# Altium footprint library Terminal_Blocks_Pluggable PCB_5.08mm.PcbLib: 299 footprints (part 13 of 19)
Each footprint in its own frame and in the unit in brackets; x right, y up, seen from the top. Pads: shape width x height; smd on the part's side, far side on the other; paste and mask are expansions set on the pad; w line width, h text height; cw(c..) or ccw(c..) is an arc to the next point about the centre after c.
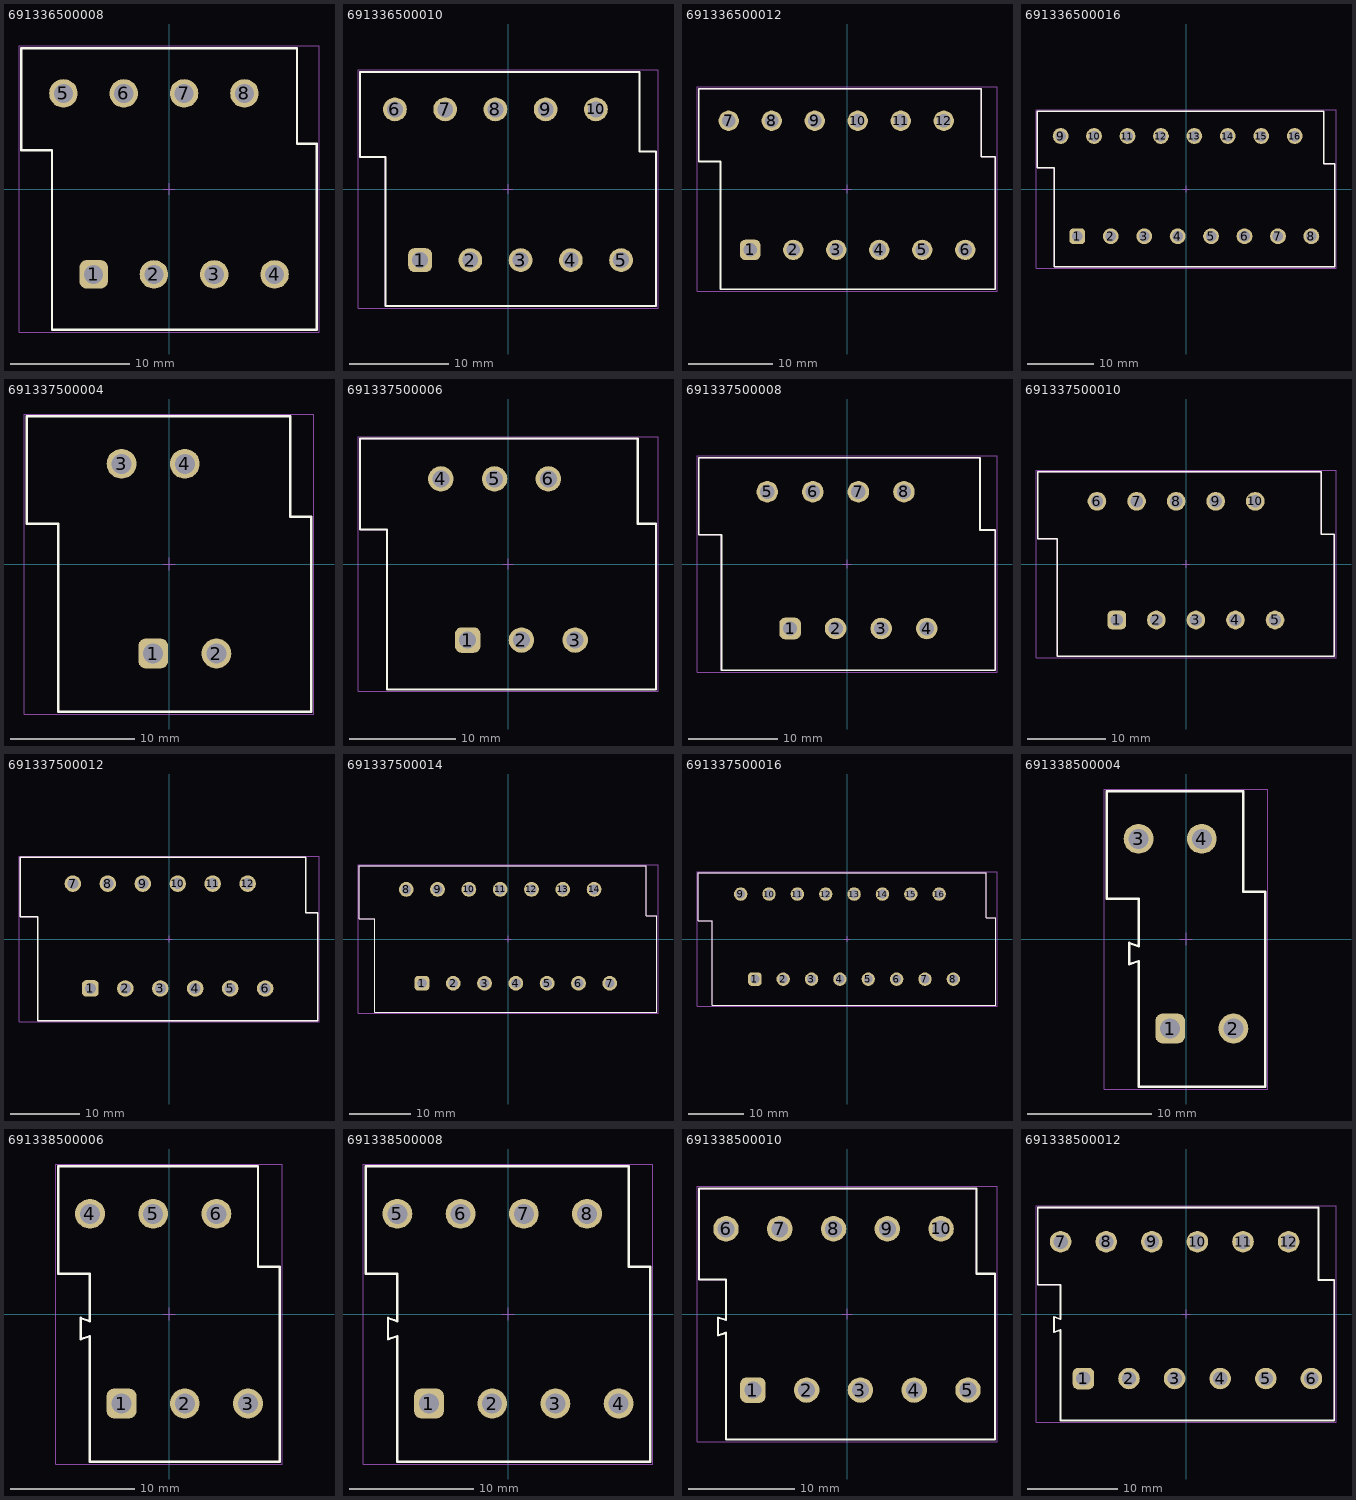
[diagram p12: the footprints below, top view; thin cyan lines are the x and y axes]

## 691336500008 [mm] "Double Level Vertical Header with Flanges, pitch 5.08mm, 08p"
height 22
pads (8):
  rrect50% 2.4x2.4 hole 1.6: 1(-6.35,-7.19)
  round 2.4 hole 1.6: 2(-1.27,-7.19) 3(3.81,-7.19) 4(8.89,-7.19) 5(-8.89,8.05) 6(-3.81,8.05) 7(1.27,8.05) 8(6.35,8.05)
Top Overlay:
  lines w0.2: -12.43,3.25 -9.85,3.25 -9.85,-11.85 12.43,-11.85 12.43,3.8 10.78,3.8 10.78,11.85 -12.43,11.85 -12.43,3.25
Top Designator:
  text ".Designator" at -7.498,-0.5 h1.5
Top Component Outline:
  lines w0.1: -12.43,3.25 -12.43,11.85 10.78,11.85 10.78,3.8 12.43,3.8 12.43,-11.85 -9.85,-11.85 -9.85,3.25 -12.43,3.25
Top 3D Body:
  lines w0.1: -12.43,3.25 -9.85,3.25 -9.85,-11.85 12.43,-11.85 12.43,3.8 10.78,3.8 10.78,11.85 -12.43,11.85 -12.43,3.25
Top Courtyard:
  lines w0.05: -12.63,-12.05 -12.63,12.05 12.63,12.05 12.63,-12.05 -12.63,-12.05
Top Component Center:
  lines w0.05: -0.5,0 0.5,0 ; 0,-0.5 0,0.5
3D body "691336500008.stp": height 22.06, standoff -3.84, extent -12.43,-11.85 12.43,11.85

## 691336500010 [mm] "Double Level Vertical Header with Flanges, pitch 5.08mm, 10p"
height 22
pads (10):
  rrect50% 2.4x2.4 hole 1.6: 1(-8.89,-7.19)
  round 2.4 hole 1.6: 2(-3.81,-7.19) 3(1.27,-7.19) 4(6.35,-7.19) 5(11.43,-7.19) 6(-11.43,8.05) 7(-6.35,8.05) 8(-1.27,8.05) 9(3.81,8.05) 10(8.89,8.05)
Top Overlay:
  lines w0.2: -14.97,3.25 -12.39,3.25 -12.39,-11.85 14.97,-11.85 14.97,3.8 13.32,3.8 13.32,11.85 -14.97,11.85 -14.97,3.25
Top Designator:
  text ".Designator" at -7.498,-0.5 h1.5
Top Component Outline:
  lines w0.1: -14.97,3.25 -14.97,11.85 13.32,11.85 13.32,3.8 14.97,3.8 14.97,-11.85 -12.39,-11.85 -12.39,3.25 -14.97,3.25
Top 3D Body:
  lines w0.1: -14.97,3.25 -12.39,3.25 -12.39,-11.85 14.97,-11.85 14.97,3.8 13.32,3.8 13.32,11.85 -14.97,11.85 -14.97,3.25
Top Courtyard:
  lines w0.05: -15.17,-12.05 -15.17,12.05 15.17,12.05 15.17,-12.05 -15.17,-12.05
Top Component Center:
  lines w0.05: -0.5,0 0.5,0 ; 0,-0.5 0,0.5
3D body "691336500010.stp": height 22.06, standoff -3.84, extent -14.97,-11.85 14.97,11.85

## 691336500012 [mm] "Double Level Vertical Header with Flanges, pitch 5.08mm, 12p"
height 22
pads (12):
  rrect50% 2.4x2.4 hole 1.6: 1(-11.43,-7.19)
  round 2.4 hole 1.6: 2(-6.35,-7.19) 3(-1.27,-7.19) 4(3.81,-7.19) 5(8.89,-7.19) 6(13.97,-7.19) 7(-13.97,8.05) 8(-8.89,8.05) 9(-3.81,8.05) 10(1.27,8.05) 11(6.35,8.05) 12(11.43,8.05)
Top Overlay:
  lines w0.2: -17.51,3.25 -17.51,11.85 15.86,11.85 15.86,3.8 17.51,3.8 17.51,-11.85 -14.93,-11.85 -14.93,3.25 -17.51,3.25
Top Designator:
  text ".Designator" at -7.498,-0.5 h1.5
Top Component Outline:
  lines w0.1: -17.51,3.25 -14.93,3.25 -14.93,-11.85 17.51,-11.85 17.51,3.8 15.86,3.8 15.86,11.85 -17.51,11.85 -17.51,3.25
Top 3D Body:
  lines w0.1: -17.51,3.25 -17.51,11.85 15.86,11.85 15.86,3.8 17.51,3.8 17.51,-11.85 -14.93,-11.85 -14.93,3.25 -17.51,3.25
Top Courtyard:
  lines w0.05: -17.71,-12.05 17.71,-12.05 17.71,12.05 -17.71,12.05 -17.71,-12.05
Top Component Center:
  lines w0.05: -0.5,0 0.5,0 ; 0,-0.5 0,0.5
3D body "691336500012.stp": height 22.06, standoff -3.84, extent -17.51,-11.85 17.51,11.85

## 691336500016 [mm] "Double Level Vertical Header with Flanges, pitch 5.08mm, 16p"
height 22
pads (16):
  rrect50% 2.4x2.4 hole 1.6: 1(-16.51,-7.19)
  round 2.4 hole 1.6: 2(-11.43,-7.19) 3(-6.35,-7.19) 4(-1.27,-7.19) 5(3.81,-7.19) 6(8.89,-7.19) 7(13.97,-7.19) 8(19.05,-7.19) 9(-19.05,8.05) 10(-13.97,8.05) 11(-8.89,8.05) 12(-3.81,8.05) 13(1.27,8.05) 14(6.35,8.05) 15(11.43,8.05) 16(16.51,8.05)
Top Overlay:
  lines w0.2: -22.59,3.25 -22.59,11.85 20.94,11.85 20.94,3.8 22.59,3.8 22.59,-11.85 -20.01,-11.85 -20.01,3.25 -22.59,3.25
Top Designator:
  text ".Designator" at -7.498,-0.5 h1.5
Top Component Outline:
  lines w0.1: -22.59,3.25 -20.01,3.25 -20.01,-11.85 22.59,-11.85 22.59,3.8 20.94,3.8 20.94,11.85 -22.59,11.85 -22.59,3.25
Top 3D Body:
  lines w0.1: -22.59,3.25 -22.59,11.85 20.94,11.85 20.94,3.8 22.59,3.8 22.59,-11.85 -20.01,-11.85 -20.01,3.25 -22.59,3.25
Top Courtyard:
  lines w0.05: -22.79,-12.05 22.79,-12.05 22.79,12.05 -22.79,12.05 -22.79,-12.05
Top Component Center:
  lines w0.05: -0.5,0 0.5,0 ; 0,-0.5 0,0.5
3D body "691336500016.stp": height 22.06, standoff -3.84, extent -22.59,-11.85 22.59,11.85

## 691337500004 [mm] "Double Level Vertical Male PCB Header with Flanges & Nut Type, pitch 5.08mm, 04p"
height 22
pads (4):
  rrect50% 2.4x2.4 hole 1.6: 1(-1.27,-7.19)
  round 2.4 hole 1.6: 2(3.81,-7.19) 3(-3.81,8.05) 4(1.27,8.05)
Top Overlay:
  lines w0.2: -11.44,3.25 -11.44,11.85 9.73,11.85 9.73,3.8 11.44,3.8 11.44,-11.85 -8.91,-11.85 -8.91,3.25 -11.44,3.25
Top Designator:
  text ".Designator" at -7.498,-0.5 h1.5
Top Component Outline:
  lines w0.1: -11.44,3.25 -8.91,3.25 -8.91,-11.85 11.44,-11.85 11.44,3.8 9.73,3.8 9.73,11.85 -11.44,11.85 -11.44,3.25
Top 3D Body:
  lines w0.1: -11.44,3.25 -11.44,11.85 9.73,11.85 9.73,3.8 11.44,3.8 11.44,-11.85 -8.91,-11.85 -8.91,3.25 -11.44,3.25
Top Courtyard:
  lines w0.05: -11.64,-12.05 -11.64,12.05 11.64,12.05 11.64,-12.05 -11.64,-12.05
Top Component Center:
  lines w0.05: -0.5,0 0.5,0 ; 0,-0.5 0,0.5
3D body "691337500004.stp": height 22.1, standoff -3.8, extent -11.43,-11.85 11.43,11.85

## 691337500006 [mm] "Double Level Vertical Male PCB Header with Flanges & Nut Type, pitch 5.08mm, 06p"
height 22
pads (6):
  rrect50% 2.4x2.4 hole 1.6: 1(-3.81,-7.19)
  round 2.4 hole 1.6: 2(1.27,-7.19) 3(6.35,-7.19) 4(-6.35,8.05) 5(-1.27,8.05) 6(3.81,8.05)
Top Overlay:
  lines w0.2: -13.98,3.25 -11.45,3.25 -11.45,-11.85 13.98,-11.85 13.98,3.8 12.27,3.8 12.27,11.85 -13.98,11.85 -13.98,3.25
Top Designator:
  text ".Designator" at -7.498,-0.5 h1.5
Top Component Outline:
  lines w0.1: -13.98,3.25 -13.98,11.85 12.27,11.85 12.27,3.8 13.98,3.8 13.98,-11.85 -11.45,-11.85 -11.45,3.25 -13.98,3.25
Top 3D Body:
  lines w0.1: -13.98,3.25 -11.45,3.25 -11.45,-11.85 13.98,-11.85 13.98,3.8 12.27,3.8 12.27,11.85 -13.98,11.85 -13.98,3.25
Top Courtyard:
  lines w0.05: -14.18,-12.05 14.18,-12.05 14.18,12.05 -14.18,12.05 -14.18,-12.05
Top Component Center:
  lines w0.05: -0.5,0 0.5,0 ; 0,-0.5 0,0.5
3D body "691337500006.stp": height 22.1, standoff -3.8, extent -13.97,-11.85 13.97,11.85

## 691337500008 [mm] "Double Level Vertical Male PCB Header with Flanges & Nut Type, pitch 5.08mm, 08p"
height 22
pads (8):
  rrect50% 2.4x2.4 hole 1.6: 1(-6.35,-7.19)
  round 2.4 hole 1.6: 2(-1.27,-7.19) 3(3.81,-7.19) 4(8.89,-7.19) 5(-8.89,8.05) 6(-3.81,8.05) 7(1.27,8.05) 8(6.35,8.05)
Top Overlay:
  lines w0.2: -16.52,3.25 -16.52,11.85 14.81,11.85 14.81,3.8 16.52,3.8 16.52,-11.85 -13.99,-11.85 -13.99,3.25 -16.52,3.25
Top Designator:
  text ".Designator" at -7.498,-0.5 h1.5
Top Component Outline:
  lines w0.1: -16.52,3.25 -13.99,3.25 -13.99,-11.85 16.52,-11.85 16.52,3.8 14.81,3.8 14.81,11.85 -16.52,11.85 -16.52,3.25
Top 3D Body:
  lines w0.1: -16.52,3.25 -16.52,11.85 14.81,11.85 14.81,3.8 16.52,3.8 16.52,-11.85 -13.99,-11.85 -13.99,3.25 -16.52,3.25
Top Courtyard:
  lines w0.05: -16.72,-12.05 -16.72,12.05 16.72,12.05 16.72,-12.05 -16.72,-12.05
Top Component Center:
  lines w0.05: -0.5,0 0.5,0 ; 0,-0.5 0,0.5
3D body "691337500008.stp": height 22.1, standoff -3.8, extent -16.51,-11.85 16.51,11.85

## 691337500010 [mm] "Double Level Vertical Male PCB Header with Flanges & Nut Type, pitch 5.08mm, 10p"
height 22
pads (10):
  rrect50% 2.4x2.4 hole 1.6: 1(-8.89,-7.19)
  round 2.4 hole 1.6: 2(-3.81,-7.19) 3(1.27,-7.19) 4(6.35,-7.19) 5(11.43,-7.19) 6(-11.43,8.05) 7(-6.35,8.05) 8(-1.27,8.05) 9(3.81,8.05) 10(8.89,8.05)
Top Overlay:
  lines w0.2: -19.06,3.25 -16.53,3.25 -16.53,-11.85 19.06,-11.85 19.06,3.8 17.35,3.8 17.35,11.85 -19.06,11.85 -19.06,3.25
Top Designator:
  text ".Designator" at -7.498,-0.5 h1.5
Top Component Outline:
  lines w0.1: -19.06,3.25 -19.06,11.85 17.35,11.85 17.35,3.8 19.06,3.8 19.06,-11.85 -16.53,-11.85 -16.53,3.25 -19.06,3.25
Top 3D Body:
  lines w0.1: -19.06,3.25 -16.53,3.25 -16.53,-11.85 19.06,-11.85 19.06,3.8 17.35,3.8 17.35,11.85 -19.06,11.85 -19.06,3.25
Top Courtyard:
  lines w0.05: -19.26,-12.05 19.26,-12.05 19.26,12.05 -19.26,12.05 -19.26,-12.05
Top Component Center:
  lines w0.05: -0.5,0 0.5,0 ; 0,-0.5 0,0.5
3D body "691337500010.stp": height 22.1, standoff -3.8, extent -19.05,-11.85 19.05,11.85

## 691337500012 [mm] "Double Level Vertical Male PCB Header with Flanges & Nut Type, pitch 5.08mm, 12p"
height 22
pads (12):
  rrect50% 2.4x2.4 hole 1.6: 1(-11.43,-7.19)
  round 2.4 hole 1.6: 2(-6.35,-7.19) 3(-1.27,-7.19) 4(3.81,-7.19) 5(8.89,-7.19) 6(13.97,-7.19) 7(-13.97,8.05) 8(-8.89,8.05) 9(-3.81,8.05) 10(1.27,8.05) 11(6.35,8.05) 12(11.43,8.05)
Top Overlay:
  lines w0.2: -21.6,3.25 -19.07,3.25 -19.07,-11.85 21.6,-11.85 21.6,3.8 19.89,3.8 19.89,11.85 -21.6,11.85 -21.6,3.25
Top Designator:
  text ".Designator" at -7.498,-0.5 h1.5
Top Component Outline:
  lines w0.1: -21.6,3.25 -21.6,11.85 19.89,11.85 19.89,3.8 21.6,3.8 21.6,-11.85 -19.07,-11.85 -19.07,3.25 -21.6,3.25
Top 3D Body:
  lines w0.1: -21.6,3.25 -19.07,3.25 -19.07,-11.85 21.6,-11.85 21.6,3.8 19.89,3.8 19.89,11.85 -21.6,11.85 -21.6,3.25
Top Courtyard:
  lines w0.05: -21.8,-12.05 21.8,-12.05 21.8,12.05 -21.8,12.05 -21.8,-12.05
Top Component Center:
  lines w0.05: -0.5,0 0.5,0 ; 0,-0.5 0,0.5
3D body "691337500012.stp": height 22.1, standoff -3.8, extent -21.6,-11.85 21.58,11.85

## 691337500014 [mm] "Double Level Vertical Male PCB Header with Flanges & Nut Type, pitch 5.08mm, 14p"
height 22
pads (14):
  rrect50% 2.4x2.4 hole 1.6: 1(-13.97,-7.19)
  round 2.4 hole 1.6: 2(-8.89,-7.19) 3(-3.81,-7.19) 4(1.27,-7.19) 5(6.35,-7.19) 6(11.43,-7.19) 7(16.51,-7.19) 8(-16.51,8.05) 9(-11.43,8.05) 10(-6.35,8.05) 11(-1.27,8.05) 12(3.81,8.05) 13(8.89,8.05) 14(13.97,8.05)
Top Overlay:
  lines w0.2: -24.14,3.25 -21.61,3.25 -21.61,-11.85 24.14,-11.85 24.14,3.8 22.43,3.8 22.43,11.85 -24.14,11.85 -24.14,3.25
Top Designator:
  text ".Designator" at -7.498,-0.5 h1.5
Top Component Outline:
  lines w0.1: -24.14,3.25 -24.14,11.85 22.43,11.85 22.43,3.8 24.14,3.8 24.14,-11.85 -21.61,-11.85 -21.61,3.25 -24.14,3.25
Top 3D Body:
  lines w0.1: -24.14,3.25 -21.61,3.25 -21.61,-11.85 24.14,-11.85 24.14,3.8 22.43,3.8 22.43,11.85 -24.14,11.85 -24.14,3.25
Top Courtyard:
  lines w0.05: -24.34,-12.05 24.34,-12.05 24.34,12.05 -24.34,12.05 -24.34,-12.05
Top Component Center:
  lines w0.05: -0.5,0 0.5,0 ; 0,-0.5 0,0.5
3D body "691337500014 (rev1).stp": height 22.1, standoff -3.8, extent -24.13,-11.85 24.13,11.85

## 691337500016 [mm] "Double Level Vertical Male PCB Header with Flanges & Nut Type, pitch 5.08mm, 16p"
height 22
pads (16):
  rrect50% 2.4x2.4 hole 1.6: 1(-16.51,-7.19)
  round 2.4 hole 1.6: 2(-11.43,-7.19) 3(-6.35,-7.19) 4(-1.27,-7.19) 5(3.81,-7.19) 6(8.89,-7.19) 7(13.97,-7.19) 8(19.05,-7.19) 9(-19.05,8.05) 10(-13.97,8.05) 11(-8.89,8.05) 12(-3.81,8.05) 13(1.27,8.05) 14(6.35,8.05) 15(11.43,8.05) 16(16.51,8.05)
Top Overlay:
  lines w0.2: -26.68,3.25 -26.68,11.85 24.97,11.85 24.97,3.8 26.68,3.8 26.68,-11.85 -24.15,-11.85 -24.15,3.25 -26.68,3.25
Top Designator:
  text ".Designator" at -7.498,-0.5 h1.5
Top Component Outline:
  lines w0.1: -26.68,3.25 -24.15,3.25 -24.15,-11.85 26.68,-11.85 26.68,3.8 24.97,3.8 24.97,11.85 -26.68,11.85 -26.68,3.25
Top 3D Body:
  lines w0.1: -26.68,3.25 -26.68,11.85 24.97,11.85 24.97,3.8 26.68,3.8 26.68,-11.85 -24.15,-11.85 -24.15,3.25 -26.68,3.25
Top Courtyard:
  lines w0.05: -26.88,-12.05 -26.88,12.05 26.88,12.05 26.88,-12.05 -26.88,-12.05
Top Component Center:
  lines w0.05: -0.5,0 0.5,0 ; 0,-0.5 0,0.5
3D body "691337500016.stp": height 22.1, standoff -3.8, extent -26.67,-11.85 26.67,11.85

## 691338500004 [mm] "Double Level Vertical Male PCB Header, pitch 5.08mm, 04p"
height 22
pads (4):
  rrect50% 2.4x2.4 hole 1.6: 1(-1.27,-7.19)
  round 2.4 hole 1.6: 2(3.81,-7.19) 3(-3.81,8.05) 4(1.27,8.05)
Top Overlay:
  lines w0.2: -6.35,3.25 -3.81,3.25 -3.81,-0.57 -4.56,-0.32 -4.56,-2.02 -3.81,-1.77 -3.81,-11.85 6.35,-11.85 6.35,3.8 4.61,3.8 4.61,11.85 -6.35,11.85 -6.35,3.25
Top Designator:
  text ".Designator" at -7.498,-0.5 h1.5
Top Component Outline:
  lines w0.1: -6.35,3.25 -6.35,11.85 4.61,11.85 4.61,3.8 6.35,3.8 6.35,-11.85 -3.81,-11.85 -3.81,-1.77 -4.56,-2.02 -4.56,-0.32 -3.81,-0.57 -3.81,3.25 -6.35,3.25
Top 3D Body:
  lines w0.1: -6.35,3.25 -3.81,3.25 -3.81,-0.57 -4.56,-0.32 -4.56,-2.02 -3.81,-1.77 -3.81,-11.85 6.35,-11.85 6.35,3.8 4.61,3.8 4.61,11.85 -6.35,11.85 -6.35,3.25
Top Courtyard:
  lines w0.05: -6.55,-12.05 -6.55,12.05 6.55,12.05 6.55,-12.05 -6.55,-12.05
Top Component Center:
  lines w0.05: -0.5,0 0.5,0 ; 0,-0.5 0,0.5
3D body "691338500004.stp": height 22.1, standoff -3.8, extent -6.35,-11.85 6.35,11.85

## 691338500006 [mm] "Double Level Vertical Male PCB Header, pitch 5.08mm, 06p"
height 22
pads (6):
  rrect50% 2.4x2.4 hole 1.6: 1(-3.81,-7.19)
  round 2.4 hole 1.6: 2(1.27,-7.19) 3(6.35,-7.19) 4(-6.35,8.05) 5(-1.27,8.05) 6(3.81,8.05)
Top Overlay:
  lines w0.2: -8.89,3.25 -8.89,11.85 7.15,11.85 7.15,3.8 8.89,3.8 8.89,-11.85 -6.35,-11.85 -6.35,-1.77 -7.1,-2.02 -7.1,-0.32 -6.35,-0.57 -6.35,3.25 -8.89,3.25
Top Designator:
  text ".Designator" at -7.498,-0.5 h1.5
Top Component Outline:
  lines w0.1: -8.89,3.25 -6.35,3.25 -6.35,-0.57 -7.1,-0.32 -7.1,-2.02 -6.35,-1.77 -6.35,-11.85 8.89,-11.85 8.89,3.8 7.15,3.8 7.15,11.85 -8.89,11.85 -8.89,3.25
Top 3D Body:
  lines w0.1: -8.89,3.25 -8.89,11.85 7.15,11.85 7.15,3.8 8.89,3.8 8.89,-11.85 -6.35,-11.85 -6.35,-1.77 -7.1,-2.02 -7.1,-0.32 -6.35,-0.57 -6.35,3.25 -8.89,3.25
Top Courtyard:
  lines w0.05: -9.09,-12.05 9.09,-12.05 9.09,12.05 -9.09,12.05 -9.09,-12.05
Top Component Center:
  lines w0.05: -0.5,0 0.5,0 ; 0,-0.5 0,0.5
3D body "691338500006.stp": height 22.1, standoff -3.8, extent -8.89,-11.85 8.89,11.85

## 691338500008 [mm] "Double Level Vertical Male PCB Header, pitch 5.08mm, 08p"
height 22
pads (8):
  rrect50% 2.4x2.4 hole 1.6: 1(-6.35,-7.19)
  round 2.4 hole 1.6: 2(-1.27,-7.19) 3(3.81,-7.19) 4(8.89,-7.19) 5(-8.89,8.05) 6(-3.81,8.05) 7(1.27,8.05) 8(6.35,8.05)
Top Overlay:
  lines w0.2: -11.43,3.25 -8.89,3.25 -8.89,-0.57 -9.64,-0.32 -9.64,-2.02 -8.89,-1.77 -8.89,-11.85 11.43,-11.85 11.43,3.8 9.69,3.8 9.69,11.85 -11.43,11.85 -11.43,3.25
Top Designator:
  text ".Designator" at -7.498,-0.5 h1.5
Top Component Outline:
  lines w0.1: -11.43,3.25 -11.43,11.85 9.69,11.85 9.69,3.8 11.43,3.8 11.43,-11.85 -8.89,-11.85 -8.89,-1.77 -9.64,-2.02 -9.64,-0.32 -8.89,-0.57 -8.89,3.25 -11.43,3.25
Top 3D Body:
  lines w0.1: -11.43,3.25 -8.89,3.25 -8.89,-0.57 -9.64,-0.32 -9.64,-2.02 -8.89,-1.77 -8.89,-11.85 11.43,-11.85 11.43,3.8 9.69,3.8 9.69,11.85 -11.43,11.85 -11.43,3.25
Top Courtyard:
  lines w0.05: -11.63,-12.05 -11.63,12.05 11.63,12.05 11.63,-12.05 -11.63,-12.05
Top Component Center:
  lines w0.05: -0.5,0 0.5,0 ; 0,-0.5 0,0.5
3D body "691338500008.stp": height 22.1, standoff -3.8, extent -11.43,-11.85 11.43,11.85

## 691338500010 [mm] "Double Level Vertical Male PCB Header, pitch 5.08mm, 10p"
height 22
pads (10):
  rrect50% 2.4x2.4 hole 1.6: 1(-8.89,-7.19)
  round 2.4 hole 1.6: 2(-3.81,-7.19) 3(1.27,-7.19) 4(6.35,-7.19) 5(11.43,-7.19) 6(-11.43,8.05) 7(-6.35,8.05) 8(-1.27,8.05) 9(3.81,8.05) 10(8.89,8.05)
Top Overlay:
  lines w0.2: -13.97,3.25 -13.97,11.85 12.23,11.85 12.23,3.8 13.97,3.8 13.97,-11.85 -11.43,-11.85 -11.43,-1.77 -12.18,-2.02 -12.18,-0.32 -11.43,-0.57 -11.43,3.25 -13.97,3.25
Top Designator:
  text ".Designator" at -7.498,-0.5 h1.5
Top Component Outline:
  lines w0.1: -13.97,3.25 -11.43,3.25 -11.43,-0.57 -12.18,-0.32 -12.18,-2.02 -11.43,-1.77 -11.43,-11.85 13.97,-11.85 13.97,3.8 12.23,3.8 12.23,11.85 -13.97,11.85 -13.97,3.25
Top 3D Body:
  lines w0.1: -13.97,3.25 -13.97,11.85 12.23,11.85 12.23,3.8 13.97,3.8 13.97,-11.85 -11.43,-11.85 -11.43,-1.77 -12.18,-2.02 -12.18,-0.32 -11.43,-0.57 -11.43,3.25 -13.97,3.25
Top Courtyard:
  lines w0.05: -14.17,-12.05 14.17,-12.05 14.17,12.05 -14.17,12.05 -14.17,-12.05
Top Component Center:
  lines w0.05: -0.5,0 0.5,0 ; 0,-0.5 0,0.5
3D body "691338500010.stp": height 22.1, standoff -3.8, extent -13.97,-11.85 13.97,11.85

## 691338500012 [mm] "Double Level Vertical Male PCB Header, pitch 5.08mm, 12p"
height 22
pads (12):
  rrect50% 2.4x2.4 hole 1.6: 1(-11.43,-7.19)
  round 2.4 hole 1.6: 2(-6.35,-7.19) 3(-1.27,-7.19) 4(3.81,-7.19) 5(8.89,-7.19) 6(13.97,-7.19) 7(-13.97,8.05) 8(-8.89,8.05) 9(-3.81,8.05) 10(1.27,8.05) 11(6.35,8.05) 12(11.43,8.05)
Top Overlay:
  lines w0.2: -16.51,3.25 -16.51,11.85 14.77,11.85 14.77,3.8 16.51,3.8 16.51,-11.85 -13.97,-11.85 -13.97,-1.77 -14.72,-2.02 -14.72,-0.32 -13.97,-0.57 -13.97,3.25 -16.51,3.25
Top Designator:
  text ".Designator" at -7.498,-0.5 h1.5
Top Component Outline:
  lines w0.1: -16.51,3.25 -13.97,3.25 -13.97,-0.57 -14.72,-0.32 -14.72,-2.02 -13.97,-1.77 -13.97,-11.85 16.51,-11.85 16.51,3.8 14.77,3.8 14.77,11.85 -16.51,11.85 -16.51,3.25
Top 3D Body:
  lines w0.1: -16.51,3.25 -16.51,11.85 14.77,11.85 14.77,3.8 16.51,3.8 16.51,-11.85 -13.97,-11.85 -13.97,-1.77 -14.72,-2.02 -14.72,-0.32 -13.97,-0.57 -13.97,3.25 -16.51,3.25
Top Courtyard:
  lines w0.05: -16.71,-12.05 16.71,-12.05 16.71,12.05 -16.71,12.05 -16.71,-12.05
Top Component Center:
  lines w0.05: -0.5,0 0.5,0 ; 0,-0.5 0,0.5
3D body "691338500012.stp": height 22.1, standoff -3.8, extent -16.51,-11.85 16.51,11.85